# Altium schematic symbol library USB-A3-C31-D-RA-CS1.SchLib: 1 symbol
Pins are listed as number, name and electrical type; pins without a type are passive.

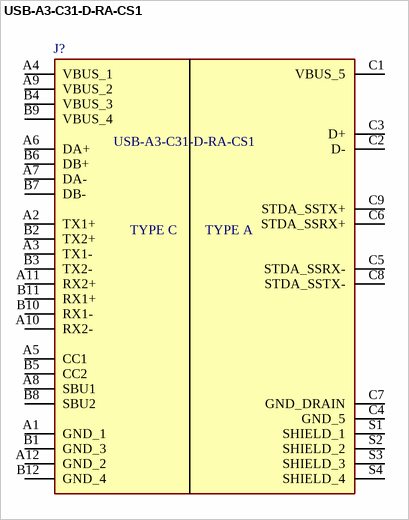
[diagram p0: symbol USB-A3-C31-D-RA-CS1]

## USB-A3-C31-D-RA-CS1
designator J?
Connector, USB TYPE-A 3.0 over TYPE-C 3.1, right angle, PCB, terminals; Manufacturer_Name: Adam Tech; Geometry.Height: 15.91mm; Manufacturer_Part_Number: USB-A3-C31-D-RA-CS1; Mouser Part Number: 737-USBA3C31DRACS1; Mouser Price/Stock: https://www.mouser.co.uk/ProductDetail/Adam-Tech/USB-A3-C31-D-RA-CS1?qs=HoCaDK9Nz5e7qYzkfwPXcA%3D%3D; Arrow Part Number: USB-A3-C31-D-RA-CS1; Arrow Price/Stock: https://www.arrow.com/en/products/usb-a3-c31-d-ra-cs1/adam-tech.html?utm_currency=USD&region=nac; Datasheet Link: https://app.adam-tech.com/products/download/data_sheet/195873/usb-a3-c31-d-ra-cs1-data-sheet.pdf
footprint USBA3C31DRACS1
pins: A1 GND_1, A2 TX1+, A3 TX1-, A4 VBUS_1, A5 CC1, A6 DA+, A7 DA-, A8 SBU1, A9 VBUS_2, A10 RX2-, A11 RX2+, A12 GND_2, B1 GND_3, B2 TX2+, B3 TX2-, B4 VBUS_3, B5 CC2, B6 DB+, B7 DB-, B8 SBU2, B9 VBUS_4, B10 RX1-, B11 RX1+, B12 GND_4, C1 VBUS_5, C2 D-, C3 D+, C4 GND_5, C5 STDA_SSRX-, C6 STDA_SSRX+, C7 GND_DRAIN, C8 STDA_SSTX-, C9 STDA_SSTX+, S1 SHIELD_1, S2 SHIELD_2, S3 SHIELD_3, S4 SHIELD_4
text: TYPE C; TYPE A